# Altium footprint library PcbLib1.PcbLib: 83 footprints (part 4 of 6)
Each footprint in its own frame and in the unit in brackets; x right, y up, seen from the top. Pads: shape width x height; smd on the part's side, far side on the other; paste and mask are expansions set on the pad; w line width, h text height; cw(c..) or ccw(c..) is an arc to the next point about the centre after c.
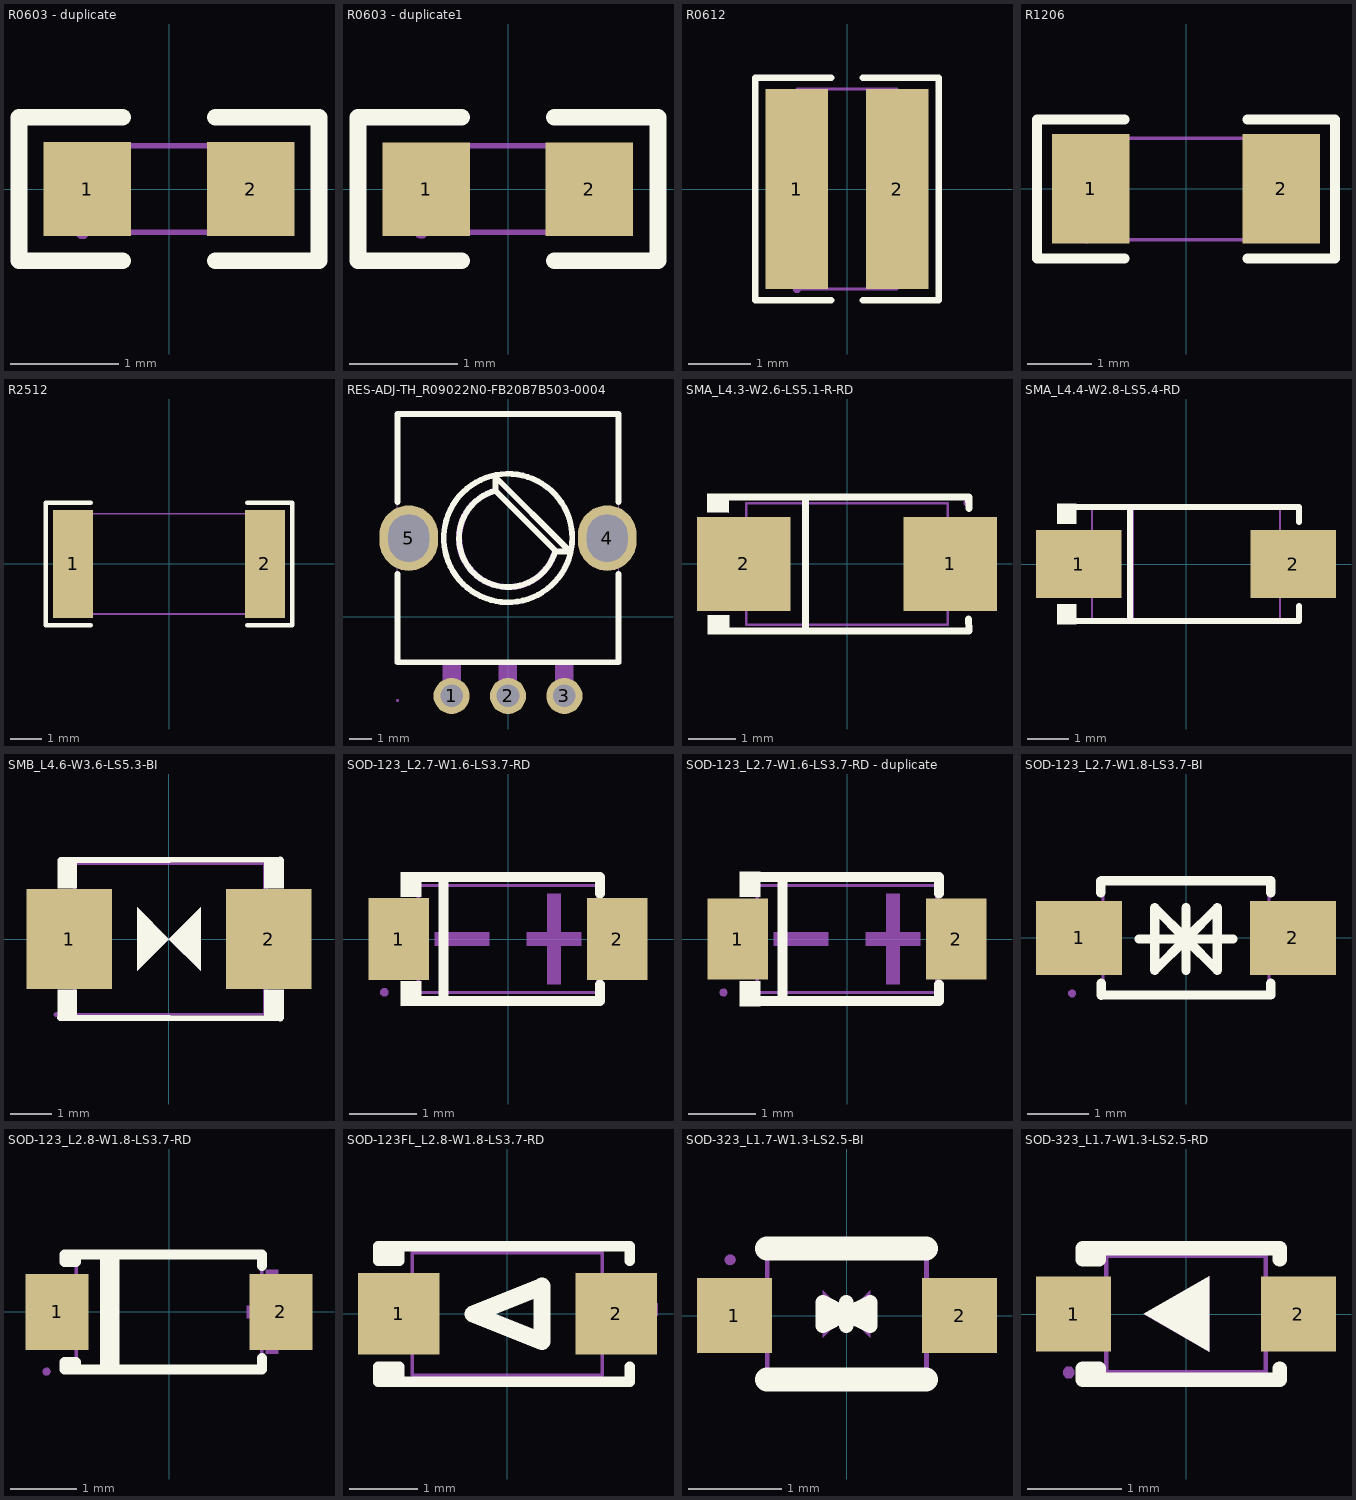
[diagram p3: the footprints below, top view; thin cyan lines are the x and y axes]

## R0603 - duplicate [mm]
pads (2):
  rect 0.806x0.864 smd paste-100 mask+0.051: 1(-0.753,0) 2(0.753,0)
Top Overlay:
  lines w0.152: -0.426,-0.661 -1.385,-0.661 -1.385,0.661 -0.426,0.661 ; 0.426,-0.661 1.385,-0.661 1.385,0.661 0.426,0.661
Top Paste:
  region: 1.195,0.45 0.395,0.45 0.345,0.4 0.345,0.172 0.715,0.172 0.715,-0.158 0.345,-0.158 0.345,-0.4 0.395,-0.45 1.195,-0.45 1.245,-0.4 1.245,0.4
  region: -1.195,-0.45 -0.395,-0.45 -0.345,-0.4 -0.345,-0.172 -0.715,-0.172 -0.715,0.158 -0.345,0.158 -0.345,0.4 -0.395,0.45 -1.195,0.45 -1.245,0.4 -1.245,-0.4
Mechanical 7:
  lines w0.051: -0.8,-0.4 -0.8,0.4 0.8,0.4 0.8,-0.4 -0.8,-0.4
Mechanical 8:
  region: -0.8,-0.34 -0.775,-0.34 -0.74,-0.375 -0.74,-0.425 -0.775,-0.46 -0.8,-0.46 -0.825,-0.46 -0.86,-0.425 -0.86,-0.375 -0.825,-0.34 -0.8,-0.34
Mechanical 9:
  region: -0.8,-0.4 -0.8,0.4 -0.5,0.4 -0.5,-0.4
  region: 0.8,-0.4 0.8,0.4 0.5,0.4 0.5,-0.4

## R0603 - duplicate1 [mil]
pads (2):
  rect 31.8x34 smd paste-3937 mask+2: 1(-29.7,0) 2(29.6,0)
Top Overlay:
  lines w6: -16.8,-26 -54.5,-26 -54.5,26.1 -16.8,26.1 ; 16.8,-26 54.5,-26 54.5,26.1 16.8,26.1
Top Paste:
  region: 47,17.8 15.5,17.8 13.6,15.8 13.6,6.8 28.1,6.8 28.1,-6.2 13.6,-6.2 13.6,-15.7 15.5,-17.7 47,-17.7 49,-15.7 49,15.8
  region: -14,15.8 -14,6.8 -29,6.8 -29,-6.2 -14,-6.2 -14,-15.7 -16,-17.7 -47.1,-17.7 -49,-15.7 -49,15.8 -47.1,17.8 -16,17.8
Mechanical 7:
  lines w2: -31.5,-15.7 -31.5,15.8 31.5,15.8 31.5,-15.7 -31.5,-15.7
Mechanical 8:
  region: -29.2,-15.7 -29.5,-17 -30.5,-17.8 -31.9,-18 -33.1,-17.5 -33.8,-16.4 -33.8,-15 -33.1,-13.9 -31.9,-13.4 -30.5,-13.6 -29.5,-14.4
Mechanical 9:
  region: -31.5,-15.7 -31.5,15.8 -19.7,15.8 -19.7,-15.7
  region: 31.5,-15.7 31.5,15.8 19.7,15.8 19.7,-15.7

## R0612 [mm]
pads (2):
  rect 1x3.2 smd paste+0.051: 1(-0.8,0) 2(0.8,0)
Top Overlay:
  lines w0.102: -0.25,-1.78 -1.47,-1.78 -1.47,1.78 -0.25,1.78 ; 0.25,-1.78 1.47,-1.78 1.47,1.78 ; 0.25,1.78 1.45,1.78
Mechanical 7:
  lines w0.051: -0.8,-1.6 0.8,-1.6 0.8,1.6 -0.8,1.6 -0.8,-1.6
Mechanical 8:
  region: -0.86,-1.6 -0.86,-1.575 -0.825,-1.54 -0.775,-1.54 -0.74,-1.575 -0.74,-1.6 -0.74,-1.625 -0.775,-1.66 -0.825,-1.66 -0.86,-1.625 -0.86,-1.6
Mechanical 9:
  region: -0.8,1.6 -0.35,1.6 -0.35,-1.6 -0.8,-1.6
  region: 0.35,1.6 0.8,1.6 0.8,-1.6 0.35,-1.6

## R1206 [mil]
pads (2):
  rect 47.5x67 smd paste-3937 mask+2: 1(-58.2,0) 2(58.2,0)
Top Overlay:
  lines w6: -37.4,-42.5 -91,-42.5 -91,42.4 -37.4,42.4 ; 37.5,-42.5 91,-42.5 91,42.4 37.5,42.4
Top Paste:
  region: -34.4,-29.6 -34.4,-15.4 -38.4,-11.4 -46.6,-11.4 -50.6,-7.5 -50.6,7.4 -46.6,11.3 -38.4,11.3 -34.4,15.3 -34.4,29.5 -38.4,33.4 -78,33.4 -82,29.5 -82,-29.6 -78,-33.5 -38.4,-33.5
  region: 34.5,-29.6 34.5,-15.4 38.4,-11.4 46.7,-11.4 50.6,-7.5 50.6,7.4 46.7,11.3 38.4,11.3 34.5,15.3 34.5,29.5 38.4,33.4 78.1,33.4 82,29.5 82,-29.6 78.1,-33.5 38.4,-33.5
Mechanical 7:
  lines w2: -61,-31 61.1,-31 61.1,31 -61,31 -61,-31
Mechanical 8:
  region: -58.6,-31 -59,-32.3 -60,-33.2 -61.3,-33.4 -62.5,-32.8 -63.3,-31.7 -63.3,-30.4 -62.5,-29.3 -61.3,-28.7 -60,-28.9 -59,-29.8
Mechanical 9:
  region: 61.1,-31 61.1,31 43.3,31 43.3,-31
  region: -61,-31 -61,31 -43.3,31 -43.3,-31

## R2512 [mil]
pads (2):
  rect 50.5x136.1 smd paste-3937 mask+2: 1(-120.7,0) 2(120.7,0)
Top Overlay:
  lines w6: -98.5,-77.1 -155,-77.1 -155,77 -98.5,77 ; 98.5,-77.1 155,-77.1 155,77 98.5,77
Top Paste:
  region: -95.5,-64.1 -95.5,-27.1 -99.4,-23.2 -108.7,-23.2 -112.7,-19.2 -112.7,19.2 -108.7,23.1 -99.4,23.1 -95.5,27 -95.5,64.1 -99.4,68 -142,68 -146,64.1 -146,-64.1 -142,-68.1 -99.4,-68.1
  region: 95.5,-64.1 95.5,-27.1 99.4,-23.2 108.7,-23.2 112.6,-19.2 112.6,19.2 108.7,23.1 99.4,23.1 95.5,27 95.5,64.1 99.4,68 142,68 146,64.1 146,-64.1 142,-68.1 99.4,-68.1
Mechanical 7:
  lines w2: -124,-63 124,-63 124,63 -124,63 -124,-63
Mechanical 8:
  region: -122.7,-63 -123,-64.3 -124,-65.2 -125.3,-65.4 -126.6,-64.8 -127.3,-63.7 -127.3,-62.4 -126.6,-61.2 -125.3,-60.7 -124,-60.9 -123,-61.7
Mechanical 9:
  region: 100.4,-63 100.4,63 124,63 124,-63
  region: -124,-63 -124,63 -100.4,63 -100.4,-63

## RES-ADJ-TH_R09022N0-FB20B7B503-0004 [mil]
pads (5):
  round 63 hole 39.4: 1(-98.4,-137.8) 2(0,-137.8) 3(98.4,-137.8)
  oval 102.4x114.2 hole 70.9 slot 82.7 at 90 deg: 4(173.2,137.8) 5(-173.2,137.8)
Top Overlay:
  lines w10: -192.9,74.9 -192.9,-78.8 192.9,-78.8 192.9,74.9 ; -192.9,200.6 -192.9,354.3 192.9,354.3 192.9,200.6 ; -21.7,220.4 -29.4,218 -36.9,214.9 -44,211 -50.8,206.5 -57.1,201.4 -62.8,195.7 -68.1,189.5 -72.7,182.8 -76.6,175.7 -79.8,168.3 -82.4,160.6 -84.2,152.7 -85.2,144.6 -85.5,136.5 -85,128.4 -83.7,120.4 -81.7,112.5 -78.9,104.9 -75.4,97.6 -71.3,90.6 -66.5,84.1 -61.1,78 -55.2,72.5 -48.7,67.5 -41.9,63.2 -34.6,59.6 -27,56.7 -19.2,54.5 -11.2,53 -3.2,52.4 4.9,52.4 13,53.3 21,54.9 28.7,57.3 36.2,60.4 43.4,64.1 50.2,68.6 56.5,73.7 62.3,79.3 67.6,85.5 72.2,92.1 76.3,99.2 79.6,106.6 82.2,114.3 ; -21.7,220.4 82.2,116.6 82.2,114.3 ; -21.7,220.4 -21.7,244.1 104.3,118.1 104.3,114.3 82.2,114.3 ; -112,133.1 -112,142.5 -111.2,151.8 -109.6,161.1 -107.3,170.2 -104.2,179 -100.4,187.6 -95.9,195.8 -90.7,203.6 -84.9,211 -78.4,217.8 -71.5,224.1 -64,229.8 -56.1,234.8 -47.7,239.2 -39.1,242.8 -30.2,245.7 -21,247.9 -11.7,249.2 -2.4,249.8 7,249.6 16.4,248.6 25.6,246.9 34.6,244.4 43.4,241.1 51.9,237.1 60,232.4 67.7,227 75,221.1 81.7,214.5 87.8,207.4 93.3,199.8 98.2,191.8 102.4,183.3 105.8,174.6 108.5,165.6 110.5,156.5 111.7,147.1 112.1,137.8 111.7,128.4 110.5,119.1 108.5,109.9 105.8,100.9 102.4,92.2 98.2,83.8 93.3,75.7 87.8,68.1 81.7,61 75,54.5 67.7,48.5 60,43.1 51.9,38.4 43.4,34.4 34.6,31.2 25.6,28.6 16.4,26.9 7,25.9 -2.4,25.7 -11.7,26.3 -21,27.7 -30.2,29.8 -39.1,32.7 -47.7,36.3 -56.1,40.7 -64,45.7 -71.5,51.4 -78.4,57.7 -84.9,64.5 -90.7,71.9 -95.9,79.7 -100.4,87.9 -104.2,96.5 -107.3,105.4 -109.6,114.5 -111.2,123.7 -112,133.1
Mechanical 6:
  region: -20.4,215.6 -28,213.2 -35.4,210 -42.4,206.2 -49,201.6 -55.1,196.4 -60.6,190.7 -65.6,184.4 -69.9,177.7 -73.5,170.5 -76.4,163.1 -78.5,155.3 -79.9,147.5 -80.4,139.5 -80.2,131.5 -79.2,123.5 -77.4,115.7 -74.8,108.2 -71.5,100.9 -67.5,94 -62.8,87.5 -57.5,81.5 -51.7,76.1 -45.3,71.2 -38.4,67.1 -31.2,63.6 -23.7,60.9 -16,58.9 -8,57.7 -0.1,57.3 7.9,57.7 15.9,58.9 23.6,60.8 31.1,63.5 38.3,67 45.2,71.2 51.6,76 57.4,81.4 62.8,87.4 67.5,93.9 71.5,100.8 74.8,108.1 77.4,115.6 78.3,117.4 79.7,118.6 81.6,119.2 83.5,119.1 85.3,118.2 86.5,116.7 87.1,114.8 87,112.9 84.3,104.9 80.9,97.3 76.8,89.9 72,83 66.7,76.6 60.7,70.7 54.2,65.3 47.3,60.6 39.9,56.6 32.2,53.2 24.2,50.6 16.1,48.7 7.7,47.6 -0.7,47.3 -9,47.7 -17.3,49 -25.5,51 -33.4,53.7 -41.1,57.2 -48.4,61.3 -55.3,66.1 -61.7,71.6 -67.5,77.6 -72.8,84.1 -77.5,91.1 -81.5,98.5 -84.8,106.2 -87.3,114.2 -89.1,122.4 -90.2,130.7 -90.5,139.1 -89.9,147.5 -88.7,155.8 -86.6,163.9 -83.8,171.8 -80.3,179.4 -76.1,186.7 -71.2,193.6 -65.7,199.9 -59.7,205.7 -53.1,211 -46.1,215.6 -38.7,219.5 -30.9,222.8 -22.9,225.3 -21,225.4 -19.1,224.7 -17.7,223.4 -16.8,221.7 -16.7,219.7 -17.3,217.9 -18.6,216.4 -20.4,215.6
Mechanical 7:
  lines w2: -192.9,-78.8 192.9,-78.8 192.9,354.3 -192.9,354.3 -192.9,-78.8
Mechanical 8:
  region: -190.6,-145.7 -190.9,-147 -191.9,-147.9 -193.3,-148 -194.5,-147.5 -195.2,-146.4 -195.2,-145 -194.5,-143.9 -193.3,-143.4 -191.9,-143.6 -190.9,-144.4
Mechanical 9:
  region: -181.1,177.1 -165.4,177.1 -165.4,98.4 -181.1,98.4
  region: 165.3,177.1 181.1,177.1 181.1,98.4 165.3,98.4
  region: -114.2,-130 -82.7,-130 -82.7,-145.7 -114.2,-145.7
  region: -15.8,-130 15.7,-130 15.7,-145.7 -15.8,-145.7
  region: 82.7,-130 114.2,-130 114.2,-145.7 82.7,-145.7
Mechanical 10:
  region: -114.2,-145.7 -82.7,-145.7 -82.7,-76.8 -114.2,-76.8
  region: 82.7,-145.7 114.2,-145.7 114.2,-76.8 82.7,-76.8
  region: -15.8,-145.7 15.7,-145.7 15.7,-76.8 -15.8,-76.8

## SMA_L4.3-W2.6-LS5.1-R-RD [mm]
pads (2):
  rect 2x2 smd paste+0.051: 1(2.2,0) 2(-2.2,0)
Top Overlay:
  region: -2.512,-1.096 -2.513,-1.503 -2.973,-1.498 -2.969,-1.096
  region: -2.52,1.502 -2.521,1.096 -2.981,1.1 -2.977,1.502
  lines w0.152: -2.596,-1.426 2.596,-1.426 ; -2.596,1.426 2.596,1.426 2.603,1.187 ; -0.884,-1.426 -0.884,1.426 ; 2.593,-1.176 2.6,-1.415
Mechanical 6:
  region: 2.014,-0.675 2.014,0.675 1.811,0.675 1.811,-0.675
  region: 2.318,-0.101 2.318,0.101 1.508,0.101 1.508,-0.101
  region: -2.317,-0.101 -2.317,0.101 -1.507,0.101 -1.507,-0.101
Mechanical 7:
  lines w0.051: -2.15,-1.3 2.15,-1.3 2.15,1.3 -2.15,1.3 -2.15,-1.3
Mechanical 8:
  region: 2.55,1.36 2.575,1.36 2.61,1.325 2.61,1.275 2.575,1.24 2.55,1.24 2.525,1.24 2.49,1.275 2.49,1.325 2.525,1.36 2.55,1.36
Mechanical 9:
  region: 2.55,0.7 2.55,-0.7 1.35,-0.7 1.35,0.7
  region: -1.35,0.7 -1.35,-0.7 -2.55,-0.7 -2.55,0.7

## SMA_L4.4-W2.8-LS5.4-RD [mil]
pads (2):
  rect 80.6x63.8 smd: 1(-101,0) 2(101,0)
Top Overlay:
  region: -103.3,-56.7 -103.3,-37.9 -121.3,-37.9 -121.3,-56.7
  region: -103.3,56.7 -103.3,37.9 -121.3,37.9 -121.3,56.7
  lines w6: -106.3,-53.7 106.4,-53.7 106.4,-39.9 ; -106.3,53.7 106.4,53.7 106.4,39.9 ; -52.7,-53.7 -52.7,53.7
Mechanical 6:
  region: -55.1,-51.2 -49.2,-51.2 -49.2,51.1 -55.1,51.1
  region: 84.4,-25.4 84.4,25.3 76.8,25.3 76.8,-25.4
  region: 95.8,-3.8 95.8,3.8 65.4,3.8 65.4,-3.8
  region: -95.7,-3.8 -95.7,3.8 -65.3,3.8 -65.3,-3.8
Mechanical 7:
  lines w2: -88.6,-54.2 88.6,-54.2 88.6,54.1 -88.6,54.1 -88.6,-54.2
Mechanical 8:
  region: -107.9,-54.2 -108.2,-55.4 -109.2,-56.3 -110.6,-56.5 -111.8,-56 -112.5,-54.8 -112.5,-53.5 -111.8,-52.4 -110.6,-51.8 -109.2,-52 -108.2,-52.9
Mechanical 9:
  region: 110.6,28.5 110.6,-28.6 65.3,-28.6 65.3,28.5
  region: -110.2,-28.6 -110.2,28.5 -64.9,28.5 -64.9,-28.6

## SMB_L4.6-W3.6-LS5.3-BI [mil]
pads (2):
  rect 80.6x94.5 smd: 1(-94.1,0) 2(94.2,0)
Top Overlay:
  region: -30,-30 -30,30 0,0
  region: 30,-30 0,0 30,30
  region: -105,-75 -105,-47.8 -87,-47.8 -87,-75
  region: -105,75 -105,47.9 -87,47.9 -87,75
  region: 90,75 90,47.9 108,47.9 108,75
  region: 90,-75 90,-47.8 108,-47.8 108,-75
  lines w6: -102.3,-74.4 105,-75 ; -102,74.3 104.9,75
Mechanical 6:
  region: -30,-30 -30,30 0,0
  region: 30,-30 0,0 30,30
Mechanical 7:
  lines w2: -89.5,-70.8 -89.5,70.9 89.6,70.9 89.6,-70.8 -89.5,-70.8 ; -88.5,-71.2 -88.5,71.3 92.6,71.3 92.6,-71.2 -88.5,-71.2
Mechanical 8:
  region: -103.9,-71.2 -104.3,-72.5 -105.3,-73.4 -106.6,-73.6 -107.8,-73 -108.5,-71.9 -108.5,-70.6 -107.8,-69.5 -106.6,-68.9 -105.3,-69.1 -104.3,-70
Mechanical 9:
  region: -106.3,40.4 -106.3,-40.3 -61.7,-40.3 -61.7,40.4
  region: 106.3,40.4 106.3,-40.3 61.7,-40.3 61.7,40.4

## SOD-123_L2.7-W1.6-LS3.7-RD [mm]
pads (2):
  rect 0.91x1.22 smd paste+0.051: 1(-1.635,0) 2(1.635,0)
Top Overlay:
  region: -1.3,1.002 -1.3,0.632 -1.605,0.632 -1.605,1.002
  region: -1.3,-1.002 -1.3,-0.632 -1.605,-0.632 -1.605,-1.002
  lines w0.152: -1.376,-0.926 1.376,-0.926 1.376,-0.683 ; -1.376,0.926 1.376,0.926 1.376,0.683 ; -0.967,-0.926 -0.967,0.926
Mechanical 6:
  region: -1.096,0.102 -1.096,-0.102 -0.28,-0.102 -0.28,0.102
  region: 1.096,0.102 1.096,-0.102 0.28,-0.102 0.28,0.102
  region: 0.79,0.68 0.79,-0.68 0.586,-0.68 0.586,0.68
Mechanical 7:
  lines w0.051: -1.345,-0.8 -1.345,0.8 1.345,0.8 1.345,-0.8 -1.345,-0.8
Mechanical 8:
  region: -1.85,-0.74 -1.825,-0.74 -1.79,-0.775 -1.79,-0.825 -1.825,-0.86 -1.85,-0.86 -1.875,-0.86 -1.91,-0.825 -1.91,-0.775 -1.875,-0.74 -1.85,-0.74
Mechanical 9:
  region: -1.845,0.3 -1.595,0.3 -1.595,-0.3 -1.845,-0.3
  region: 1.595,0.3 1.845,0.3 1.845,-0.3 1.595,-0.3
Mechanical 10:
  region: 1.81,0.3 1.33,0.3 1.33,-0.3 1.81,-0.3
  region: -1.81,-0.3 -1.33,-0.3 -1.33,0.3 -1.81,0.3

## SOD-123_L2.7-W1.6-LS3.7-RD - duplicate [mil]
pads (2):
  rect 35.8x48 smd: 1(-64.4,0) 2(64.4,0)
Top Overlay:
  region: -51.2,39.5 -51.2,24.9 -63.2,24.9 -63.2,39.5
  region: -51.2,-39.5 -51.2,-24.9 -63.2,-24.9 -63.2,-39.5
  lines w6: -54.2,-36.5 54.2,-36.5 54.2,-26.9 ; -54.2,36.5 54.2,36.5 54.2,26.9 ; -38,-36.5 -38,36.5
Mechanical 6:
  region: -43.1,4 -43.1,-4 -11,-4 -11,4
  region: 43.2,4 43.2,-4 11,-4 11,4
  region: 31.1,26.8 31.1,-26.8 23.1,-26.8 23.1,26.8
Mechanical 7:
  lines w2: -52.9,-31.5 -52.9,31.5 53,31.5 53,-31.5 -52.9,-31.5
Mechanical 8:
  region: -70.5,-31.5 -70.8,-32.8 -71.8,-33.7 -73.2,-33.8 -74.4,-33.3 -75.1,-32.2 -75.1,-30.8 -74.4,-29.7 -73.2,-29.2 -71.8,-29.4 -70.8,-30.2
Mechanical 9:
  region: -72.6,11.8 -62.8,11.8 -62.8,-11.8 -72.6,-11.8
  region: 62.8,11.8 72.7,11.8 72.7,-11.8 62.8,-11.8
Mechanical 10:
  region: 71.3,11.8 52.4,11.8 52.4,-11.8 71.3,-11.8
  region: -71.2,-11.8 -52.3,-11.8 -52.3,11.8 -71.2,11.8

## SOD-123_L2.7-W1.8-LS3.7-BI [mm]
pads (2):
  rect 1.4x1.2 smd paste+0.051: 1(-1.735,0) 2(1.735,0)
Top Overlay:
  lines w0.15: -0.762,-0.016 0.762,-0.016 ; 0,-0.524 0,0.492 ; 0,-0.27 0,0.238 ; 0,-0.016 0.508,0.492 0.508,-0.524 0,-0.016 ; 0,-0.016 -0.508,-0.524 -0.508,0.492 0,-0.016
  lines w0.152: -1.382,0.732 -1.382,0.925 ; -1.377,-0.927 -1.377,-0.734 ; -1.376,-0.926 1.376,-0.926 1.376,-0.733 ; -1.376,0.926 1.376,0.926 1.376,0.733
Mechanical 7:
  lines w0.051: -1.35,-0.9 1.35,-0.9 1.35,0.9 -1.35,0.9 -1.35,-0.9
Mechanical 8:
  region: -1.91,-0.9 -1.91,-0.875 -1.875,-0.84 -1.825,-0.84 -1.79,-0.875 -1.79,-0.9 -1.79,-0.925 -1.825,-0.96 -1.875,-0.96 -1.91,-0.925 -1.91,-0.9
Mechanical 9:
  region: 1.25,-0.5 1.25,0.5 1.85,0.5 1.85,-0.5
  region: -1.85,-0.5 -1.85,0.5 -1.25,0.5 -1.25,-0.5

## SOD-123_L2.8-W1.8-LS3.7-RD [mm]
pads (2):
  rect 0.95x1.151 smd: 1(-1.692,0) 2(1.692,0)
Top Overlay:
  lines w0.152: -0.97,-0.866 -0.97,0.866 ; -0.828,-0.866 -0.828,0.866 ; 1.405,-0.699 1.405,-0.866 -1.407,-0.866 ; 1.405,0.696 1.405,0.866 -1.407,0.866 ; -1.407,-0.866 -1.407,-0.757 -1.58,-0.757 -1.58,-0.866 -1.407,-0.866 ; -1.407,0.866 -1.407,0.754 -1.58,0.754 -1.58,0.866 -1.407,0.866
Mechanical 6:
  region: 1.651,0.635 1.651,-0.63 1.46,-0.63 1.46,0.635
  region: 1.935,0.097 1.935,-0.094 1.176,-0.094 1.176,0.097
  region: -2.029,0.094 -2.029,-0.097 -1.273,-0.097 -1.273,0.094
Mechanical 7:
  lines w0.051: -1.4,-0.902 1.4,-0.902 1.4,0.899 -1.4,0.899 -1.4,-0.902
Mechanical 8:
  region: -1.791,-0.902 -1.801,-0.935 -1.826,-0.955 -1.859,-0.96 -1.89,-0.947 -1.908,-0.917 -1.908,-0.884 -1.89,-0.856 -1.859,-0.841 -1.826,-0.846 -1.801,-0.869
Mechanical 9:
  region: 1.849,-0.467 1.849,0.465 1.3,0.465 1.3,-0.467
  region: -1.852,-0.467 -1.852,0.465 -1.3,0.465 -1.3,-0.467

## SOD-123FL_L2.8-W1.8-LS3.7-RD [mil]
pads (2):
  rect 47.2x47.2 smd: 1(-63,0) 2(63,0)
Top Overlay:
  lines w6: -70.5,-39.4 -70.5,-30.7 ; -70.5,30.7 -70.5,39.3 ; -66.6,-39.4 -66.6,-30.7 ; -66.6,30.7 -66.6,39.3 ; -62.6,-39.4 -62.6,-30.7 -74.8,-30.7 -74.8,-39.4 63,-39.4 70.9,-39.4 70.9,-30.7 ; -62.6,39.3 -62.6,30.7 -74.8,30.7 -74.8,39.3 55.1,39.3 ; 47.3,39.3 70.9,39.3 70.9,30.7
  lines w10: -20,0 20,-16 20,16 -20,0
Mechanical 6:
  region: 65.2,-17.2 65.2,17.4 72.3,17.4 72.3,-17.2
  region: 87.3,-1 52.6,-1 52.6,6.1 87.3,6.1
  region: -51.7,-3.7 -86.4,-3.7 -86.4,3.4 -51.7,3.4
Mechanical 7:
  lines w2: -55.1,-35.5 55.1,-35.5 55.1,35.4 -55.1,35.4 -55.1,-35.5
Mechanical 8:
  region: -70.5,-35.5 -70.8,-36.7 -71.8,-37.6 -73.2,-37.8 -74.4,-37.2 -75.1,-36.1 -75.1,-34.8 -74.4,-33.7 -73.2,-33.1 -71.8,-33.3 -70.8,-34.2
Mechanical 9:
  region: -72.8,18.7 -41.3,18.7 -41.3,-18.7 -72.8,-18.7
  region: 41.4,18.7 72.9,18.7 72.9,-18.7 41.4,-18.7

## SOD-323_L1.7-W1.3-LS2.5-BI [mil]
pads (2):
  rect 31.5x31.5 smd: 1(-47.4,0) 2(47.5,0)
Top Overlay:
  lines w6.1: -5.2,0.6 -0.1,0.6 9.8,5.6 9.8,-4.4 -0.1,0.5 ; -0.3,0.7 -10.2,5.6 -10.2,-4.4 -0.3,0.6 4.8,0.6 ; -0.2,-4.4 -0.2,5.6
  lines w10: -33.7,-26.9 33.3,-26.9 ; -33.7,28.2 33.3,28.2
Mechanical 6:
  region: -10.2,10.6 -10.2,-9.4 -0.2,0.6
  region: 9.8,-9.4 9.8,10.6 -0.2,0.6
Mechanical 7:
  lines w2: -33.5,-24.6 -33.5,24.6 33.5,24.6 33.5,-24.6 -33.5,-24.6
Mechanical 8:
  region: -46.8,23.5 -47.2,22.2 -48.2,21.3 -49.5,21.1 -50.7,21.7 -51.5,22.8 -51.5,24.1 -50.7,25.2 -49.5,25.8 -48.2,25.6 -47.2,24.7
Mechanical 9:
  region: 37.2,-6.4 37.2,6.4 49.2,6.4 49.2,-6.4
  region: -49.2,-6.4 -49.2,6.4 -37.6,6.4 -37.6,-6.4
Mechanical 10:
  region: 32.9,-6.4 32.9,6.4 37.6,6.4 37.6,-6.4
  region: -38,-6.4 -38,6.4 -33.3,6.4 -33.3,-6.4

## SOD-323_L1.7-W1.3-LS2.5-RD [mm]
pads (2):
  rect 0.8x0.8 smd paste+0.051: 1(-1.2,0) 2(1.2,0)
Top Overlay:
  region: -0.45,0 0.25,0.4 0.25,-0.4
  lines w0.152: -1.014,-0.7 -1.014,-0.58 ; -1.014,0.58 -1.014,0.7 ; -0.927,-0.7 -0.927,-0.58 -1.1,-0.58 -1.1,-0.7 0.9,-0.7 1,-0.7 1,-0.58 ; -0.927,0.7 -0.927,0.58 -1.1,0.58 -1.1,0.7 0.9,0.7 1,0.7 1,0.58
Mechanical 6:
  region: -1.5,0.09 -0.9,0.09 -0.9,-0.09 -1.5,-0.09
  region: 1.11,-0.3 1.11,0.3 1.29,0.3 1.29,-0.3
  region: 0.9,0.09 1.5,0.09 1.5,-0.09 0.9,-0.09
  region: -0.45,0 0.25,0.4 0.25,-0.4
Mechanical 7:
  lines w0.051: -0.85,-0.625 -0.85,0.625 0.85,0.625 0.85,-0.625 -0.85,-0.625
Mechanical 8:
  region: -1.25,-0.565 -1.225,-0.565 -1.19,-0.6 -1.19,-0.65 -1.225,-0.685 -1.25,-0.685 -1.275,-0.685 -1.31,-0.65 -1.31,-0.6 -1.275,-0.565 -1.25,-0.565
Mechanical 9:
  region: -1.25,-0.163 -1.25,0.163 -0.95,0.163 -0.95,-0.163
  region: 0.95,-0.163 0.95,0.163 1.25,0.163 1.25,-0.163
Mechanical 10:
  region: -0.96,-0.163 -0.96,0.163 -0.84,0.163 -0.84,-0.163
  region: 0.84,-0.163 0.84,0.163 0.96,0.163 0.96,-0.163